# Altium schematic symbol library FSM6JSMATR.SchLib: 1 symbol
Pins are listed as number, name and electrical type; pins without a type are passive.

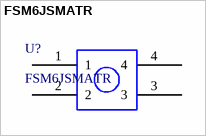
[diagram p0: symbol FSM6JSMATR]

## FSM6JSMATR
designator U?
FSM6JSMATR=TACT SWITCH 6X6MIL; Manufacturer_Name: TE Connectivity; Copyright: Copyright (C) 2025 Ultra Librarian. All rights reserved.; Manufacturer_Part_Number: FSM6JSMATR; RefDes: RefDes; Type: Type
footprint SWITCH_FSM6JSMATR_TYC
pins: 1, 2, 3, 4